# EAGLE library part SXLP-450+ (library SXLP-450+)
465MHz (Cutoff) Frequency Low Pass RF Filter (Radio Frequency) Bandwidth 2.5dB 8-SMD, No Lead Source: Datasheet <https://www.minicircuits.com/pdfs/SXLP-450 .pdf?srsltid=AfmBOopyfng1W_JE_YCYT7VOxU4Z8bevNLx0xfxbggheauuZmJBv02wv>
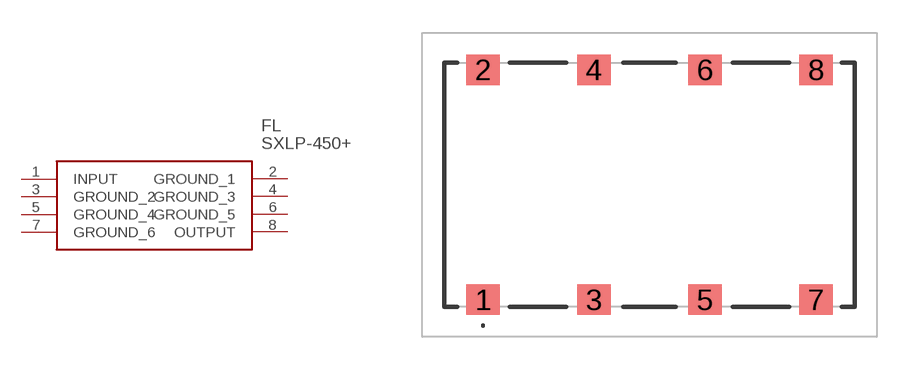
[diagram p0: symbol with the pads of SXLP450; footprint SXLP450]

Designator prefix FL

## SXLP-450+ (Description: 465MHz (Cutoff) Frequency Low Pass RF Filter (Radio Frequency) Bandwidth 2.5dB 8-SMD, No Lead; Height: 6.86mm; Manufacturer_Name: Mini-Circuits; Manufacturer_Part_Number: SXLP-450+)  [SXLP450]
1  INPUT
2  GROUND_1
3  GROUND_2
4  GROUND_3
5  GROUND_4
6  GROUND_5
7  GROUND_6
8  OUTPUT

## Footprint SXLP450 (pad centres in mm)
HF1139_2024-1
smd 1.52 x 1.4: 1 -7.62,-5.27; 2 -7.62,5.27; 3 -2.54,-5.27; 4 -2.54,5.27; 5 2.54,-5.27; 6 2.54,5.27; 7 7.62,-5.27; 8 7.62,5.27